# Altium schematic symbol library Schlib1.SchLib: 5 symbols
Pins are listed as number, name and electrical type; pins without a type are passive.

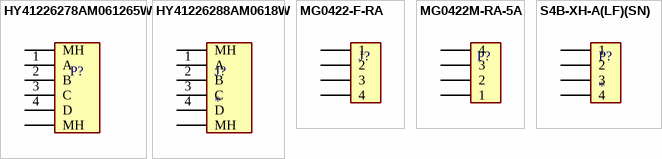
[diagram p0: symbols HY41226278AM061265W to S4B-XH-A(LF)(SN)]

## HY41226278AM061265W
designator P?
POGO MALE 5-48V/3A
footprint HY41226278AM061265W
pins: 1 A, 2 B, 3 C, 4 D, MH, MH

## HY41226288AM0618W
designator J?
POGO RECPT 5-48V/3A
footprint HY41226288AM0618W
pins: 1 A, 2 B, 3 C, 4 D, MH, MH

## MG0422-F-RA
designator J?
POGO RECPT 5A 36V
footprint MG0422-F-RA
pins: 1, 2, 3, 4

## MG0422M-RA-5A
designator P?
POGO MALE 5A 36V
footprint MG0422M-RA-5A
pins: 1, 2, 3, 4

## S4B-XH-A(LF)(SN)
designator P?
Conn Shrouded Header (4 Sides) HDR 4 POS 2.5mm Solder RA Side Entry Thru-Hole Box; MF: J.S.T. Manufacturing Co; MP: S4B-XH-A(LF)(SN); SnapEDA_Link: https://www.snapeda.com/parts/S4B-XH-A(LF)(SN)/ACT/view-part/?ref=snap; Availability: In Stock; Price: None; Value: *; Check_prices: https://www.snapeda.com/parts/S4B-XH-A(LF)(SN)/ACT/view-part/?ref=eda; Package: None
footprint JST_S4B-XH-A(LF)(SN)
pins: 1, 2, 3, 4